# Altium footprint library Footprint-Lib-PhilsLab.PcbLib: 351 footprints (part 14 of 22)
Each footprint in its own frame and in the unit in brackets; x right, y up, seen from the top. Pads: shape width x height; smd on the part's side, far side on the other; paste and mask are expansions set on the pad; w line width, h text height; cw(c..) or ccw(c..) is an arc to the next point about the centre after c.
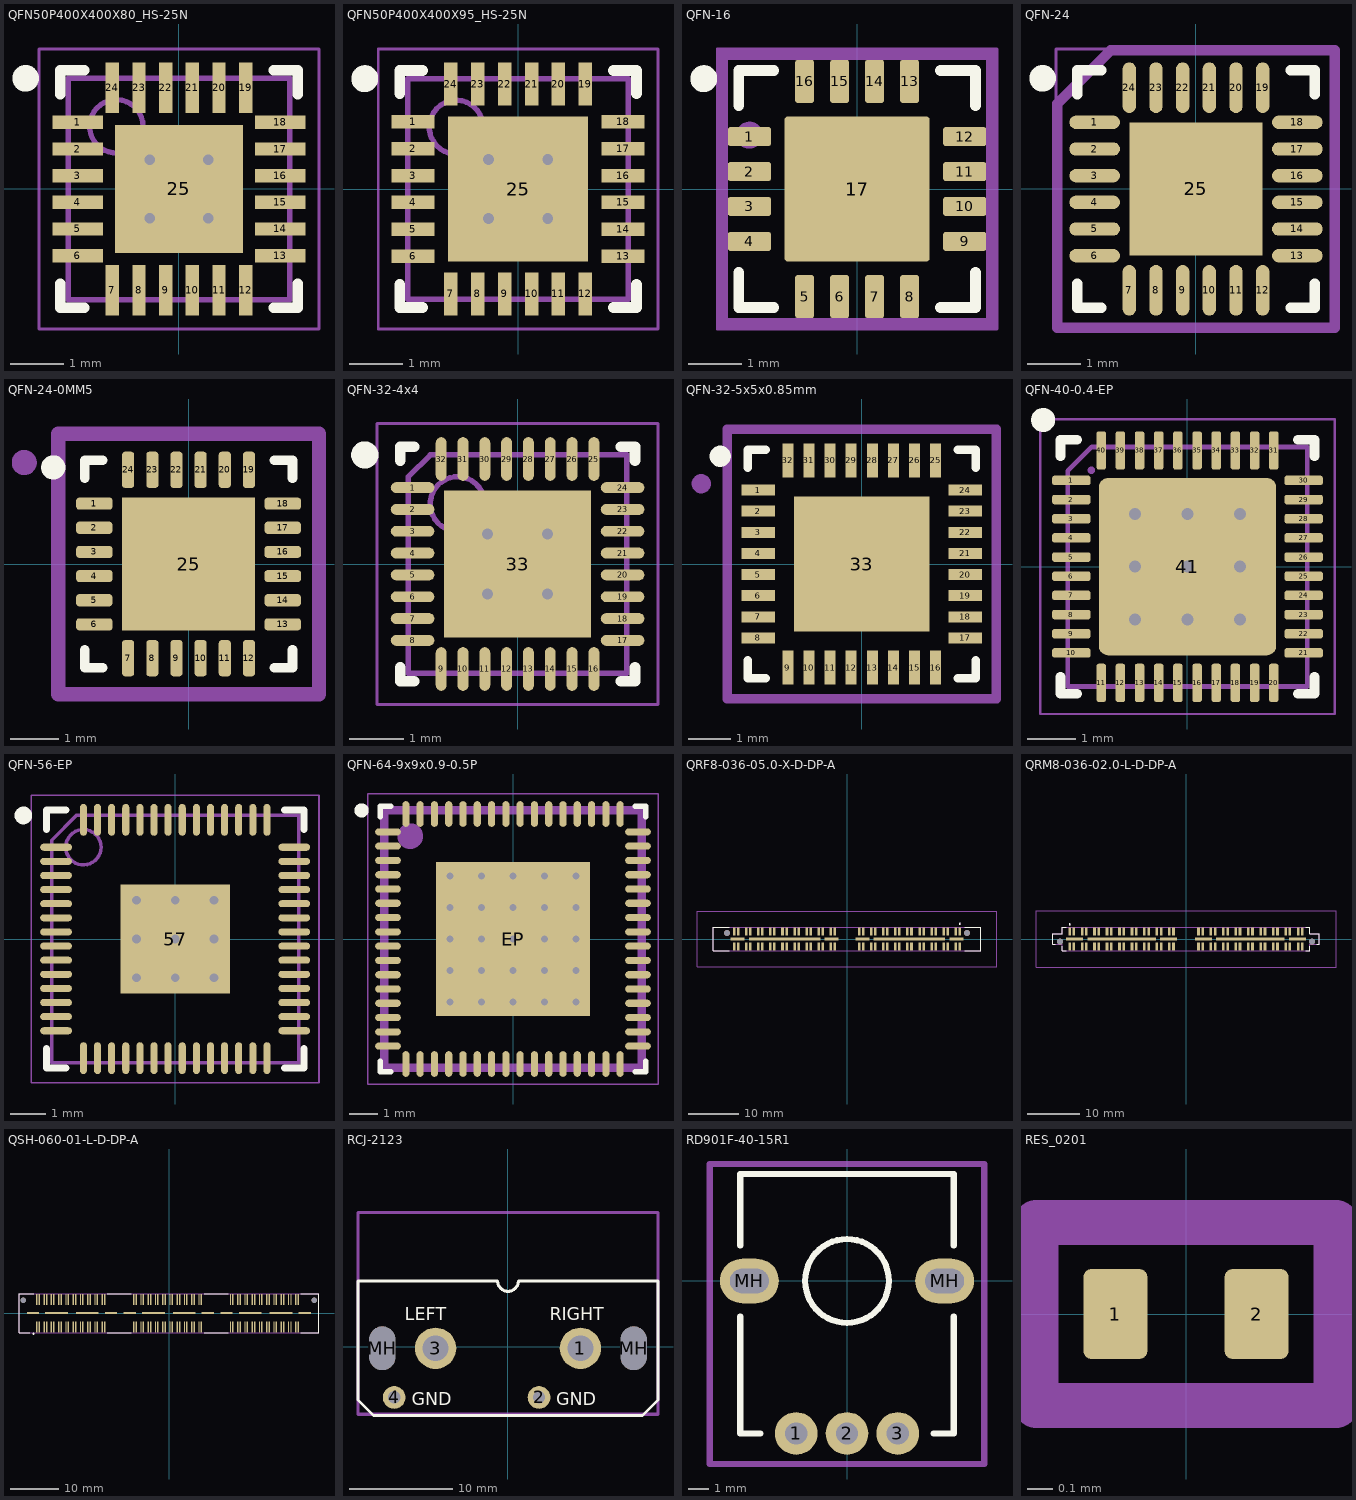
[diagram p13: the footprints below, top view; thin cyan lines are the x and y axes]

## QFN50P400X400X80_HS-25N [mm] "QFN, 24-Leads, Body 4.00x4.00mm, Pitch 0.50mm, Thermal Pad 2.50x2.50mm, IPC Medium Density"
height 0.8
pads (25):
  rect 0.95x0.25 smd mask+0.05: 1(-1.9,1.25) 2(-1.9,0.75) 3(-1.9,0.25) 4(-1.9,-0.25) 5(-1.9,-0.75) 6(-1.9,-1.25) 13(1.9,-1.25) 14(1.9,-0.75) 15(1.9,-0.25) 16(1.9,0.25) 17(1.9,0.75) 18(1.9,1.25)
  rect 0.25x0.95 smd mask+0.05: 7(-1.25,-1.9) 8(-0.75,-1.9) 9(-0.25,-1.9) 10(0.25,-1.9) 11(0.75,-1.9) 12(1.25,-1.9) 19(1.25,1.9) 20(0.75,1.9) 21(0.25,1.9) 22(-0.25,1.9) 23(-0.75,1.9) 24(-1.25,1.9)
  rect 2.4x2.4 smd mask+0.07: 25(0,0)
via 0.55,-0.55 diameter 0.5 hole 0.2
via -0.55,-0.55 diameter 0.5 hole 0.2
via 0.55,0.55 diameter 0.5 hole 0.2
via -0.55,0.55 diameter 0.5 hole 0.2
Top Overlay:
  circle w0.25: c-2.875,2.075 r0.125
  lines w0.2: -2.225,-1.775 -2.225,-2.225 -1.775,-2.225 ; -2.225,1.775 -2.225,2.225 -1.775,2.225 ; 1.775,-2.225 2.225,-2.225 2.225,-1.775 ; 1.775,2.225 2.225,2.225 2.225,1.775
Mechanical 13:
  circle w0.1: c-1.175,1.175 r0.5
  lines w0.1: -2.075,-2.075 2.075,-2.075 2.075,2.075 -2.075,2.075 -2.075,-2.075
  text "'.Designator'" at -5.84,-0.925 h1
Mechanical 15:
  lines w0.05: -2.625,-2.625 2.625,-2.625 2.625,2.625 -2.625,2.625 -2.625,-2.625
  lines w0.1: -0.5,0 0.5,0 ; 0,-0.5 0,0.5
3D body "QFN50P400X400X80_HS-25N.step": height 0.8, standoff 0, extent -2.125,-2.125 2.125,2.125

## QFN50P400X400X95_HS-25N [mm] "QFN, 24-Leads, Body 4.00x4.00mm, Pitch 0.50mm, Thermal Pad 2.60x2.70mm, IPC Medium Density"
height 0.95
pads (25):
  rect 0.8x0.25 smd mask+0.05: 1(-1.95,1.25) 2(-1.95,0.75) 3(-1.95,0.25) 4(-1.95,-0.25) 5(-1.95,-0.75) 6(-1.95,-1.25) 13(1.95,-1.25) 14(1.95,-0.75) 15(1.95,-0.25) 16(1.95,0.25) 17(1.95,0.75) 18(1.95,1.25)
  rect 0.25x0.8 smd mask+0.05: 7(-1.25,-1.95) 8(-0.75,-1.95) 9(-0.25,-1.95) 10(0.25,-1.95) 11(0.75,-1.95) 12(1.25,-1.95) 19(1.25,1.95) 20(0.75,1.95) 21(0.25,1.95) 22(-0.25,1.95) 23(-0.75,1.95) 24(-1.25,1.95)
  rect 2.6x2.7 smd mask+0.05: 25(0,0)
via -0.55,0.55 diameter 0.5 hole 0.2
via 0.55,0.55 diameter 0.5 hole 0.2
via -0.55,-0.55 diameter 0.5 hole 0.2
via 0.55,-0.55 diameter 0.5 hole 0.2
Top Overlay:
  circle w0.25: c-2.85,2.05 r0.125
  lines w0.2: -2.2,-1.775 -2.2,-2.2 -1.775,-2.2 ; -2.2,1.775 -2.2,2.2 -1.775,2.2 ; 1.775,-2.2 2.2,-2.2 2.2,-1.775 ; 1.775,2.2 2.2,2.2 2.2,1.775
Mechanical 13:
  circle w0.1: c-1.15,1.15 r0.5
  lines w0.1: -2.05,-2.05 -2.05,2.05 2.05,2.05 2.05,-2.05 -2.05,-2.05
  text "'.Designator'" at -5.84,-0.925 h1
Mechanical 15:
  lines w0.05: -2.6,-2.6 -2.6,2.6 2.6,2.6 2.6,-2.6 -2.6,-2.6
  lines w0.1: -0.5,0 0.5,0 ; 0,-0.5 0,0.5
3D body "ICM-20689.STEP": height 0.94, standoff -0.01, extent -2,-2 2,2

## QFN-16 [mm]
height 1
pads (17):
  rrect25% 0.8x0.35 smd mask+0.07: 1(-2,0.975) 2(-2,0.325) 3(-2,-0.325) 4(-2,-0.975) 9(2,-0.975) 10(2,-0.325) 11(2,0.325) 12(2,0.975)
  rrect25% 0.35x0.8 smd mask+0.07: 5(-0.975,-2) 6(-0.325,-2) 7(0.325,-2) 8(0.975,-2) 13(0.975,2) 14(0.325,2) 15(-0.325,2) 16(-0.975,2)
  rrect5% 2.7x2.7 smd mask+0.07: 17(0,0)
Top Overlay:
  circle w0.25: c-2.85,2.05 r0.125
  lines w0.2: -2.2,-1.55 -2.2,-2.2 -1.55,-2.2 ; -2.2,1.55 -2.2,2.2 -1.55,2.2 ; 1.55,-2.2 2.2,-2.2 2.2,-1.55 ; 1.55,2.2 2.2,2.2 2.2,1.55
Mechanical 13:
  circle w0.25: c-2,1 r0.125
  lines w0.2: -2.5,-2.5 2.5,-2.5 2.5,2.5 -2.5,2.5 -2.5,-2.5
  text "'.Designator'" at -5.665,-0.417 h1
Mechanical 15:
  lines w0.05: -2.6,-2.6 2.6,-2.6 2.6,2.6 -2.6,2.6 -2.6,-2.6
  lines w0.1: -0.5,0 0.5,0 ; 0,-0.5 0,0.5
3D body "QFN-16.step": height 1, standoff 0, extent -2.13,-2.13 2.13,2.13

## QFN-24 [mm] "QFN, 24-Leads, Body 4.00x4.00mm, Pitch 0.50mm, Thermal Pad 2.50x2.50mm, IPC Medium Density"
height 1
pads (25):
  oval 0.95x0.25 smd mask+0.03: 1(-1.9,1.25) 2(-1.9,0.75) 3(-1.9,0.25) 4(-1.9,-0.25) 5(-1.9,-0.75) 6(-1.9,-1.25) 13(1.9,-1.25) 14(1.9,-0.75) 15(1.9,-0.25) 16(1.9,0.25) 17(1.9,0.75) 18(1.9,1.25)
  oval 0.25x0.95 smd mask+0.03: 7(-1.25,-1.9) 8(-0.75,-1.9) 9(-0.25,-1.9) 10(0.25,-1.9) 11(0.75,-1.9) 12(1.25,-1.9) 19(1.25,1.9) 20(0.75,1.9) 21(0.25,1.9) 22(-0.25,1.9) 23(-0.75,1.9) 24(-1.25,1.9)
  rect 2.5x2.5 smd mask+0.03: 25(0,0)
Top Overlay:
  circle w0.25: c-2.875,2.075 r0.125
  lines w0.2: -2.225,-1.775 -2.225,-2.225 -1.775,-2.225 ; -2.225,1.775 -2.225,2.225 -1.775,2.225 ; 1.775,-2.225 2.225,-2.225 2.225,-1.775 ; 1.775,2.225 2.225,2.225 2.225,1.775
Mechanical 13:
  lines w0.2: -2.6,-2.6 2.6,-2.6 2.6,2.6 -1.6,2.6 -2.6,1.6 -2.6,-2.6
  text "'.Designator'" at -6.315,-1.4 h1
Mechanical 15:
  lines w0.05: -2.625,-2.625 -2.625,2.625 2.625,2.625 2.625,-2.625 -2.625,-2.625
  lines w0.1: -0.5,0 0.5,0 ; 0,-0.5 0,0.5
3D body "QFN-24.step": height 1, standoff 0, extent -2.076,-2.076 2.076,2.076

## QFN-24-0MM5 [mm]
height 0.6
pads (25):
  rrect50% 0.75x0.25 smd mask+0.05: 1(-1.95,1.25) 2(-1.95,0.75) 3(-1.95,0.25) 4(-1.95,-0.25) 5(-1.95,-0.75) 6(-1.95,-1.25) 13(1.95,-1.25) 14(1.95,-0.75) 15(1.95,-0.25) 16(1.95,0.25) 17(1.95,0.75) 18(1.95,1.25)
  rrect50% 0.25x0.75 smd mask+0.05: 7(-1.25,-1.95) 8(-0.75,-1.95) 9(-0.25,-1.95) 10(0.25,-1.95) 11(0.75,-1.95) 12(1.25,-1.95) 19(1.25,1.95) 20(0.75,1.95) 21(0.25,1.95) 22(-0.25,1.95) 23(-0.75,1.95) 24(-1.25,1.95)
  rect 2.75x2.75 smd mask+0.3: 25(0,0)
Top Overlay:
  circle w0.25: c-2.8,2 r0.125
  lines w0.2: -2.15,-1.775 -2.15,-2.15 -1.775,-2.15 ; -2.15,1.775 -2.15,2.15 -1.775,2.15 ; 1.775,-2.15 2.15,-2.15 2.15,-1.775 ; 1.775,2.15 2.15,2.15 2.15,1.775
Mechanical 13:
  circle w0.3: c-3.4,2.1 r0.109
  lines w0.3: -2.7,-2.7 2.7,-2.7 2.7,2.7 -2.7,2.7 -2.7,-2.7
  text "'.Designator'" at -5.815,-0.9 h1
Mechanical 15:
  lines w0.05: -2.575,-2.575 2.575,-2.575 2.575,2.575 -2.575,2.575 -2.575,-2.575
  lines w0.1: -0.5,0 0.5,0 ; 0,-0.5 0,0.5
3D body "QFN-24-0MM5.step": height 0.6, standoff 0, extent -2.001,-2.001 2.001,2.001

## QFN-32-4x4 [mm] "QFN, 32-Leads, Body 4.00x4.00mm, Pitch 0.40mm, Thermal Pad 2.70x2.70mm, IPC Medium Density"
height 0.9
pads (33):
  oval 0.8x0.2 smd mask+0.05: 1(-1.925,1.4) 2(-1.925,1) 3(-1.925,0.6) 4(-1.925,0.2) 5(-1.925,-0.2) 6(-1.925,-0.6) 7(-1.925,-1) 8(-1.925,-1.4) 17(1.925,-1.4) 18(1.925,-1) 19(1.925,-0.6) 20(1.925,-0.2) 21(1.925,0.2) 22(1.925,0.6) 23(1.925,1) 24(1.925,1.4)
  oval 0.2x0.8 smd mask+0.05: 9(-1.4,-1.925) 10(-1,-1.925) 11(-0.6,-1.925) 12(-0.2,-1.925) 13(0.2,-1.925) 14(0.6,-1.925) 15(1,-1.925) 16(1.4,-1.925) 25(1.4,1.925) 26(1,1.925) 27(0.6,1.925) 28(0.2,1.925) 29(-0.2,1.925) 30(-0.6,1.925) 31(-1,1.925) 32(-1.4,1.925)
  rect 2.7x2.7 smd mask+0.05: 33(0,0)
via 0.55,-0.55 diameter 0.5 hole 0.2
via -0.55,-0.55 diameter 0.5 hole 0.2
via 0.55,0.55 diameter 0.5 hole 0.2
via -0.55,0.55 diameter 0.5 hole 0.2
Top Overlay:
  circle w0.25: c-2.8,2 r0.125
  lines w0.2: -2.15,-1.9 -2.15,-2.15 -1.9,-2.15 ; -2.15,1.9 -2.15,2.15 -1.9,2.15 ; 1.9,-2.15 2.15,-2.15 2.15,-1.9 ; 1.9,2.15 2.15,2.15 2.15,1.9
Mechanical 13:
  circle w0.1: c-1.1,1.1 r0.5
  lines w0.1: -2,-2 -2,1.6 -1.6,2 2,2 2,-2 -2,-2
  text "'.Designator'" at -7.231,-1.087 h1.25
Mechanical 15:
  lines w0.05: -2.575,-2.575 2.575,-2.575 2.575,2.575 -2.575,2.575 -2.575,-2.575
  lines w0.1: -0.5,0 0.5,0 ; 0,-0.5 0,0.5
3D body "QFN40P400X400X90_HS-33N.step": height 0.9, standoff 0, extent -2.02,-2.02 2.02,2.02

## QFN-32-5x5x0.85mm [mm]
height 1
pads (33):
  rect 0.8x0.26 smd mask+0.125: 1(-2.45,1.75) 2(-2.45,1.25) 3(-2.45,0.75) 4(-2.45,0.25) 5(-2.45,-0.25) 6(-2.45,-0.75) 7(-2.45,-1.25) 8(-2.45,-1.75) 17(2.45,-1.75) 18(2.45,-1.25) 19(2.45,-0.75) 20(2.45,-0.25) 21(2.45,0.25) 22(2.45,0.75) 23(2.45,1.25) 24(2.45,1.75)
  rect 0.26x0.8 smd mask+0.125: 9(-1.75,-2.45) 10(-1.25,-2.45) 11(-0.75,-2.45) 12(-0.25,-2.45) 13(0.25,-2.45) 14(0.75,-2.45) 15(1.25,-2.45) 16(1.75,-2.45) 25(1.75,2.45) 26(1.25,2.45) 27(0.75,2.45) 28(0.25,2.45) 29(-0.25,2.45) 30(-0.75,2.45) 31(-1.25,2.45) 32(-1.75,2.45)
  rect 3.2x3.2 smd: 33(0,0)
Top Overlay:
  circle w0.25: c-3.35,2.55 r0.125
  lines w0.2: -2.7,-2.275 -2.7,-2.7 -2.275,-2.7 ; -2.7,2.275 -2.7,2.7 -2.275,2.7 ; 2.275,-2.7 2.7,-2.7 2.7,-2.275 ; 2.275,2.7 2.7,2.7 2.7,2.275
Mechanical 13:
  circle w0.254: c-3.8,1.9 r0.1
  lines w0.2: -3.2,-3.2 3.2,-3.2 3.2,3.2 -3.2,3.2 -3.2,-3.2
  text "'.Designator'" at -5.665,-0.417 h1
Mechanical 15:
  lines w0.05: -3.1,-3.1 3.1,-3.1 3.1,3.1 -3.1,3.1 -3.1,-3.1
  lines w0.1: -0.5,0 0.5,0 ; 0,-0.5 0,0.5
3D body "QFN-32-5x5x0.85mm.step": height 1, standoff 0, extent -2.551,-2.551 2.551,2.551

## QFN-40-0.4-EP [mm] "QFN 40 Pads 0.4mm Pitch Thermal Pad"
height 0.9
pads (41):
  rrect50% 0.8x0.2 smd mask+0.15: 1(-2.425,1.8) 2(-2.425,1.4) 3(-2.425,1) 4(-2.425,0.6) 5(-2.425,0.2) 6(-2.425,-0.2) 7(-2.425,-0.6) 8(-2.425,-1) 9(-2.425,-1.4) 10(-2.425,-1.8) 21(2.425,-1.8) 22(2.425,-1.4) 23(2.425,-1) 24(2.425,-0.6) 25(2.425,-0.2) 26(2.425,0.2) 27(2.425,0.6) 28(2.425,1) 29(2.425,1.4) 30(2.425,1.8)
  rrect50% 0.2x0.8 smd mask+0.15: 11(-1.8,-2.425) 12(-1.4,-2.425) 13(-1,-2.425) 14(-0.6,-2.425) 15(-0.2,-2.425) 16(0.2,-2.425) 17(0.6,-2.425) 18(1,-2.425) 19(1.4,-2.425) 20(1.8,-2.425) 31(1.8,2.425) 32(1.4,2.425) 33(1,2.425) 34(0.6,2.425) 35(0.2,2.425) 36(-0.2,2.425) 37(-0.6,2.425) 38(-1,2.425) 39(-1.4,2.425) 40(-1.8,2.425)
  rrect10% 3.7x3.7 smd mask+0.15: 41(0,0)
via 1.1,-1.1 diameter 0.6 hole 0.25
via 0,-1.1 diameter 0.6 hole 0.25
via -1.1,-1.1 diameter 0.6 hole 0.25
via 1.1,0 diameter 0.6 hole 0.25
via 0,0 diameter 0.6 hole 0.25
via -1.1,0 diameter 0.6 hole 0.25
via 1.1,1.1 diameter 0.6 hole 0.25
via 0,1.1 diameter 0.6 hole 0.25
via -1.1,1.1 diameter 0.6 hole 0.25
Top Overlay:
  circle w0.25: c-3.012,3.061 r0.125
  lines w0.2: -2.65,-2.3 -2.65,-2.65 -2.3,-2.65 ; -2.65,2.3 -2.65,2.65 -2.3,2.65 ; 2.3,-2.65 2.65,-2.65 2.65,-2.3 ; 2.3,2.65 2.65,2.65 2.65,2.3
Mechanical 13:
  circle w0.1: c-2.007,2.012 r0.028
  lines w0.1: -2.5,-2.5 -2.5,2 -2,2.5 2.5,2.5 2.5,-2.5 -2.5,-2.5
  text "'.Designator'" at -5.815,-0.9 h1
Mechanical 15:
  lines w0.05: -3.075,-3.075 3.075,-3.075 3.075,3.075 -3.075,3.075 -3.075,-3.075
  lines w0.1: -0.5,0 0.5,0 ; 0,-0.5 0,0.5
3D body "QFN-40-0.4-EP.step": height 0.9, standoff 0, extent -2.501,-2.501 2.501,2.501

## QFN-56-EP [mm]
height 0.9
pads (57):
  oval 0.9x0.2 smd mask+0.15: 1(-3.375,2.6) 2(-3.375,2.2) 3(-3.375,1.8) 4(-3.375,1.4) 5(-3.375,1) 6(-3.375,0.6) 7(-3.375,0.2) 8(-3.375,-0.2) 9(-3.375,-0.6) 10(-3.375,-1) 11(-3.375,-1.4) 12(-3.375,-1.8) 13(-3.375,-2.2) 14(-3.375,-2.6) 29(3.375,-2.6) 30(3.375,-2.2) 31(3.375,-1.8) 32(3.375,-1.4) 33(3.375,-1) 34(3.375,-0.6) 35(3.375,-0.2) 36(3.375,0.2) 37(3.375,0.6) 38(3.375,1) 39(3.375,1.4) 40(3.375,1.8) 41(3.375,2.2) 42(3.375,2.6)
  oval 0.2x0.9 smd mask+0.15: 15(-2.6,-3.375) 16(-2.2,-3.375) 17(-1.8,-3.375) 18(-1.4,-3.375) 19(-1,-3.375) 20(-0.6,-3.375) 21(-0.2,-3.375) 22(0.2,-3.375) 23(0.6,-3.375) 24(1,-3.375) 25(1.4,-3.375) 26(1.8,-3.375) 27(2.2,-3.375) 28(2.6,-3.375) 43(2.6,3.375) 44(2.2,3.375) 45(1.8,3.375) 46(1.4,3.375) 47(1,3.375) 48(0.6,3.375) 49(0.2,3.375) 50(-0.2,3.375) 51(-0.6,3.375) 52(-1,3.375) 53(-1.4,3.375) 54(-1.8,3.375) 55(-2.2,3.375) 56(-2.6,3.375)
  rect 3.1x3.1 smd: 57(0,0)
via -1.1,1.1 diameter 0.6 hole 0.25
via 0,1.1 diameter 0.6 hole 0.25
via 1.1,1.1 diameter 0.6 hole 0.25
via -1.1,0 diameter 0.6 hole 0.25
via 0,0 diameter 0.6 hole 0.25
via 1.1,0 diameter 0.6 hole 0.25
via -1.1,-1.1 diameter 0.6 hole 0.25
via 0,-1.1 diameter 0.6 hole 0.25
via 1.1,-1.1 diameter 0.6 hole 0.25
Top Overlay:
  circle w0.25: c-4.3,3.5 r0.125
  lines w0.2: -3.65,-3.1 -3.65,-3.65 -3.1,-3.65 ; -3.65,3.1 -3.65,3.65 -3.1,3.65 ; 3.1,-3.65 3.65,-3.65 3.65,-3.1 ; 3.1,3.65 3.65,3.65 3.65,3.1
Mechanical 13:
  circle w0.1: c-2.6,2.6 r0.5
  lines w0.1: -3.5,-3.5 -3.5,2.8 -2.8,3.5 3.5,3.5 3.5,-3.5 -3.5,-3.5
  text "'.Designator'" at -6.315,-1.4 h1
Mechanical 15:
  lines w0.05: -4.075,-4.075 -4.075,4.075 4.075,4.075 4.075,-4.075 -4.075,-4.075
  lines w0.1: -0.5,0 0.5,0 ; 0,-0.5 0,0.5
3D body "RP2040.STEP": height 1.01, standoff 0.01, extent -3.51,-3.51 3.51,3.51

## QFN-64-9x9x0.9-0.5P [mm] "QFN, 64-Leads, Body 9.00x9.00mm, Pitch 0.50mm, Thermal Pad 5.40x5.40mm, IPC Medium Density"
height 1
pads (65):
  oval 0.9x0.25 smd mask+0.05: 1(-4.375,3.75) 2(-4.375,3.25) 3(-4.375,2.75) 4(-4.375,2.25) 5(-4.375,1.75) 6(-4.375,1.25) 7(-4.375,0.75) 8(-4.375,0.25) 9(-4.375,-0.25) 10(-4.375,-0.75) 11(-4.375,-1.25) 12(-4.375,-1.75) 13(-4.375,-2.25) 14(-4.375,-2.75) 15(-4.375,-3.25) 16(-4.375,-3.75) 33(4.375,-3.75) 34(4.375,-3.25) 35(4.375,-2.75) 36(4.375,-2.25) 37(4.375,-1.75) 38(4.375,-1.25) 39(4.375,-0.75) 40(4.375,-0.25) 41(4.375,0.25) 42(4.375,0.75) 43(4.375,1.25) 44(4.375,1.75) 45(4.375,2.25) 46(4.375,2.75) 47(4.375,3.25) 48(4.375,3.75)
  oval 0.25x0.9 smd mask+0.05: 17(-3.75,-4.375) 18(-3.25,-4.375) 19(-2.75,-4.375) 20(-2.25,-4.375) 21(-1.75,-4.375) 22(-1.25,-4.375) 23(-0.75,-4.375) 24(-0.25,-4.375) 25(0.25,-4.375) 26(0.75,-4.375) 27(1.25,-4.375) 28(1.75,-4.375) 29(2.25,-4.375) 30(2.75,-4.375) 31(3.25,-4.375) 32(3.75,-4.375) 49(3.75,4.375) 50(3.25,4.375) 51(2.75,4.375) 52(2.25,4.375) 53(1.75,4.375) 54(1.25,4.375) 55(0.75,4.375) 56(0.25,4.375) 57(-0.25,4.375) 58(-0.75,4.375) 59(-1.25,4.375) 60(-1.75,4.375) 61(-2.25,4.375) 62(-2.75,4.375) 63(-3.25,4.375) 64(-3.75,4.375)
  rect 5.4x5.4 smd: EP(0,0)
via 2.2,-2.2 diameter 0.6 hole 0.25
via 1.1,-2.2 diameter 0.6 hole 0.25
via 0,-2.2 diameter 0.6 hole 0.25
via -1.1,-2.2 diameter 0.6 hole 0.25
via -2.2,-2.2 diameter 0.6 hole 0.25
via 2.2,-1.1 diameter 0.6 hole 0.25
via 1.1,-1.1 diameter 0.6 hole 0.25
via 0,-1.1 diameter 0.6 hole 0.25
via -1.1,-1.1 diameter 0.6 hole 0.25
via -2.2,-1.1 diameter 0.6 hole 0.25
via 2.2,0 diameter 0.6 hole 0.25
via 1.1,0 diameter 0.6 hole 0.25
via 0,0 diameter 0.6 hole 0.25
via -1.1,0 diameter 0.6 hole 0.25
via -2.2,0 diameter 0.6 hole 0.25
via 2.2,1.1 diameter 0.6 hole 0.25
via 1.1,1.1 diameter 0.6 hole 0.25
via 0,1.1 diameter 0.6 hole 0.25
via -1.1,1.1 diameter 0.6 hole 0.25
via -2.2,1.1 diameter 0.6 hole 0.25
via 2.2,2.2 diameter 0.6 hole 0.25
via 1.1,2.2 diameter 0.6 hole 0.25
via 0,2.2 diameter 0.6 hole 0.25
via -1.1,2.2 diameter 0.6 hole 0.25
via -2.2,2.2 diameter 0.6 hole 0.25
Top Overlay:
  circle w0.25: c-5.3,4.5 r0.125
  lines w0.2: -4.65,-4.275 -4.65,-4.65 -4.275,-4.65 ; -4.65,4.275 -4.65,4.65 -4.275,4.65 ; 4.275,-4.65 4.65,-4.65 4.65,-4.275 ; 4.275,4.65 4.65,4.65 4.65,4.275
Mechanical 13:
  circle w0.5: c-3.6,3.6 r0.2
  lines w0.3: -4.5,-4.5 4.5,-4.5 4.5,4.5 -4.5,4.5 -4.5,-4.5
  text "'.Designator'" at -5.665,-0.417 h1
Mechanical 15:
  lines w0.05: -5.075,-5.075 5.075,-5.075 5.075,5.075 -5.075,5.075 -5.075,-5.075
  lines w0.1: -0.5,0 0.5,0 ; 0,-0.5 0,0.5
3D body "QFN-64-9x9x0.9-0.5P.step": height 1, standoff 0, extent -4.501,-4.501 4.501,4.501

## QRF8-036-05.0-X-D-DP-A [mm]
pads (80):
  rect 0.5x1.65 smd: 1(22.4,1.475) 2(22.4,-1.475) 3(21.6,1.475) 4(21.6,-1.475) 5(20,1.475) 6(20,-1.475) 7(19.2,1.475) 8(19.2,-1.475) 9(17.6,1.475) 10(17.6,-1.475) 11(16.8,1.475) 12(16.8,-1.475) 13(15.2,1.475) 14(15.2,-1.475) 15(14.4,1.475) 16(14.4,-1.475) 17(12.8,1.475) 18(12.8,-1.475) 19(12,1.475) 20(12,-1.475) 21(10.4,1.475) 22(10.4,-1.475) 23(9.6,1.475) 24(9.6,-1.475) 25(8,1.475) 26(8,-1.475) 27(7.2,1.475) 28(7.2,-1.475) 29(5.6,1.475) 30(5.6,-1.475) 31(4.8,1.475) 32(4.8,-1.475) 33(3.2,1.475) 34(3.2,-1.475) 35(2.4,1.475) 36(2.4,-1.475) 37(-2.4,1.475) 38(-2.4,-1.475) 39(-3.2,1.475) 40(-3.2,-1.475) 41(-4.8,1.475) 42(-4.8,-1.475) 43(-5.6,1.475) 44(-5.6,-1.475) 45(-7.2,1.475) 46(-7.2,-1.475) 47(-8,1.475) 48(-8,-1.475) 49(-9.6,1.475) 50(-9.6,-1.475) 51(-10.4,1.475) 52(-10.4,-1.475) 53(-12,1.475) 54(-12,-1.475) 55(-12.8,1.475) 56(-12.8,-1.475) 57(-14.4,1.475) 58(-14.4,-1.475) 59(-15.2,1.475) 60(-15.2,-1.475) 61(-16.8,1.475) 62(-16.8,-1.475) 63(-17.6,1.475) 64(-17.6,-1.475) 65(-19.2,1.475) 66(-19.2,-1.475) 67(-20,1.475) 68(-20,-1.475) 69(-21.6,1.475) 70(-21.6,-1.475) 71(-22.4,1.475) 72(-22.4,-1.475)
  rect 2.76x0.56 smd: 73(-21.72,0) 73(-3.08,0) 73(3.08,0) 73(21.72,0)
  rect 14.19x0.56 smd: 73(-12.4,0) 73(12.4,0)
  round 1.13 hole 1.13 unplated: ""(-23.8,1.2) ""(23.8,1.2)
Top Overlay:
  circle w0.2: c22.4,3 r0.1
  lines w0.2: -23.4,-2.3 -26.585,-2.3 -26.585,2.3 -23.4,2.3 ; 23.4,-2.3 26.585,-2.3 26.585,2.3 23.4,2.3
Mechanical 13:
  circle w0.2: c22.4,3 r0.1
  lines w0.1: -26.585,-2.3 -26.585,2.3 26.585,2.3 26.585,-2.3 -26.585,-2.3
  text "'.Designator'" at -6.315,-1.4 h1
Mechanical 15:
  lines w0.05: -29.765,-5.48 29.765,-5.48 29.765,5.48 -29.765,5.48 -29.765,-5.48
3D body "QRF8-036-05_0-L-D-DP-A.stp": height 6.51, standoff -1.03, extent -26.585,-2.3 26.585,2.3

## QRM8-036-02.0-L-D-DP-A [mm]
pads (80):
  rect 0.5x1.5 smd: 1(-22.4,1.425) 2(-22.4,-1.425) 3(-21.6,1.425) 4(-21.6,-1.425) 5(-20,1.425) 6(-20,-1.425) 7(-19.2,1.425) 8(-19.2,-1.425) 9(-17.6,1.425) 10(-17.6,-1.425) 11(-16.8,1.425) 12(-16.8,-1.425) 13(-15.2,1.425) 14(-15.2,-1.425) 15(-14.4,1.425) 16(-14.4,-1.425) 17(-12.8,1.425) 18(-12.8,-1.425) 19(-12,1.425) 20(-12,-1.425) 21(-10.4,1.425) 22(-10.4,-1.425) 23(-9.6,1.425) 24(-9.6,-1.425) 25(-8,1.425) 26(-8,-1.425) 27(-7.2,1.425) 28(-7.2,-1.425) 29(-5.6,1.425) 30(-5.6,-1.425) 31(-4.8,1.425) 32(-4.8,-1.425) 33(-3.2,1.425) 34(-3.2,-1.425) 35(-2.4,1.425) 36(-2.4,-1.425) 37(2.4,1.425) 38(2.4,-1.425) 39(3.2,1.425) 40(3.2,-1.425) 41(4.8,1.425) 42(4.8,-1.425) 43(5.6,1.425) 44(5.6,-1.425) 45(7.2,1.425) 46(7.2,-1.425) 47(8,1.425) 48(8,-1.425) 49(9.6,1.425) 50(9.6,-1.425) 51(10.4,1.425) 52(10.4,-1.425) 53(12,1.425) 54(12,-1.425) 55(12.8,1.425) 56(12.8,-1.425) 57(14.4,1.425) 58(14.4,-1.425) 59(15.2,1.425) 60(15.2,-1.425) 61(16.8,1.425) 62(16.8,-1.425) 63(17.6,1.425) 64(17.6,-1.425) 65(19.2,1.425) 66(19.2,-1.425) 67(20,1.425) 68(20,-1.425) 69(21.6,1.425) 70(21.6,-1.425) 71(22.4,1.425) 72(22.4,-1.425)
  rect 3.28x0.51 smd: 73(-21.46,0) 73(-3.33,0) 73(3.33,0) 73(21.46,0)
  rect 13.15x0.51 smd: 73(-12.395,0) 73(12.395,0)
  round 1.13 hole 1.13 unplated: ""(-24.25,-0.5) ""(24.25,-0.5)
Top Overlay:
  circle w0.2: c-22.4,2.81 r0.1
  lines w0.2: -25.165,-1.05 -25.685,-1.05 -25.685,1.05 -23.825,1.05 -23.825,2.3 -23,2.3 ; -23.825,-1.415 -23.825,-2.3 -23,-2.3 ; 23,-2.3 23.825,-2.3 23.825,-1.415 ; 23,2.3 23.825,2.3 23.825,1.05 25.685,1.05 25.685,-1.05 25.165,-1.05
Mechanical 13:
  circle w0.2: c-22.4,2.81 r0.1
  lines w0.1: -25.685,-1.05 -23.825,-1.05 -23.825,-2.3 23.825,-2.3 23.825,-1.05 25.685,-1.05 25.685,1.05 23.825,1.05 23.825,2.3 -23.825,2.3 -23.825,1.05 -25.685,1.05 -25.685,-1.05
  text "'.Designator'" at -6.315,-1.4 h1
Mechanical 15:
  lines w0.05: -28.865,-5.48 28.865,-5.48 28.865,5.48 -28.865,5.48 -28.865,-5.48
3D body "QRM8-036-02_0-L-D-DP-A.stp": height 4.82, standoff -1.31, extent -25.685,-2.3 25.685,2.3

## QSH-060-01-L-D-DP-A [mm]
pads (134):
  rect 0.28x2.27 smd mask+0.13: 1(-27.3,-2.87) 2(-27.3,2.87) 3(-26.8,-2.87) 4(-26.8,2.87) 5(-25.8,-2.87) 6(-25.8,2.87) 7(-25.3,-2.87) 8(-25.3,2.87) 9(-24.3,-2.87) 10(-24.3,2.87) 11(-23.8,-2.87) 12(-23.8,2.87) 13(-22.8,-2.87) 14(-22.8,2.87) 15(-22.3,-2.87) 16(-22.3,2.87) 17(-21.3,-2.87) 18(-21.3,2.87) 19(-20.8,-2.87) 20(-20.8,2.87) 21(-19.8,-2.87) 22(-19.8,2.87) 23(-19.3,-2.87) 24(-19.3,2.87) 25(-18.3,-2.87) 26(-18.3,2.87) 27(-17.8,-2.87) 28(-17.8,2.87) 29(-16.8,-2.87) 30(-16.8,2.87) 31(-16.3,-2.87) 32(-16.3,2.87) 33(-15.3,-2.87) 34(-15.3,2.87) 35(-14.8,-2.87) 36(-14.8,2.87) 37(-13.8,-2.87) 38(-13.8,2.87) 39(-13.3,-2.87) 40(-13.3,2.87) 41(-7.3,-2.87) 42(-7.3,2.87) 43(-6.8,-2.87) 44(-6.8,2.87) 45(-5.8,-2.87) 46(-5.8,2.87) 47(-5.3,-2.87) 48(-5.3,2.87) 49(-4.3,-2.87) 50(-4.3,2.87) 51(-3.8,-2.87) 52(-3.8,2.87) 53(-2.8,-2.87) 54(-2.8,2.87) 55(-2.3,-2.87) 56(-2.3,2.87) 57(-1.3,-2.87) 58(-1.3,2.87) 59(-0.8,-2.87) 60(-0.8,2.87) 61(0.2,-2.87) 62(0.2,2.87) 63(0.7,-2.87) 64(0.7,2.87) 65(1.7,-2.87) 66(1.7,2.87) 67(2.2,-2.87) 68(2.2,2.87) 69(3.2,-2.87) 70(3.2,2.87) 71(3.7,-2.87) 72(3.7,2.87) 73(4.7,-2.87) 74(4.7,2.87) 75(5.2,-2.87) 76(5.2,2.87) 77(6.2,-2.87) 78(6.2,2.87) 79(6.7,-2.87) 80(6.7,2.87) 81(12.7,-2.87) 82(12.7,2.87) 83(13.2,-2.87) 84(13.2,2.87) 85(14.2,-2.87) 86(14.2,2.87) 87(14.7,-2.87) 88(14.7,2.87) 89(15.7,-2.87) 90(15.7,2.87) 91(16.2,-2.87) 92(16.2,2.87) 93(17.2,-2.87) 94(17.2,2.87) 95(17.7,-2.87) 96(17.7,2.87) 97(18.7,-2.87) 98(18.7,2.87) 99(19.2,-2.87) 100(19.2,2.87) 101(20.2,-2.87) 102(20.2,2.87) 103(20.7,-2.87) 104(20.7,2.87) 105(21.7,-2.87) 106(21.7,2.87) 107(22.2,-2.87) 108(22.2,2.87) 109(23.2,-2.87) 110(23.2,2.87) 111(23.7,-2.87) 112(23.7,2.87) 113(24.7,-2.87) 114(24.7,2.87) 115(25.2,-2.87) 116(25.2,2.87) 117(26.2,-2.87) 118(26.2,2.87) 119(26.7,-2.87) 120(26.7,2.87)
  rect 2.54x0.43 smd: EP(-28.12,0) EP(-11.99,0) EP(-8.11,0) EP(8.02,0) EP(11.9,0) EP(28.03,0)
  rect 4.7x0.43 smd: EP(-23.23,0) EP(-16.88,0) EP(-3.22,0) EP(3.13,0) EP(16.79,0) EP(23.14,0)
  round 1.05 hole 1.05 unplated: MH(-30.114,2.67) MH(30.01,2.67)
Top Overlay:
  circle w0.3: c-28,-4.25 r0.1
  lines w0.2: -28.75,-4 -31,-4 -31,4 -28,4 ; -12.75,-4 -7.8,-4 ; -12.75,4 -7.8,4 ; 7.25,-4 12.2,-4 ; 7.25,4 12.2,4 ; 27.25,-4 31,-4 31,4 27.25,4
Mechanical 13:
  lines w0.2: -31,-4 -31,4 31,4 31,-4 -31,-4
  text "'.Designator'" at -5.815,-0.9 h1
  text "1" at -28.657,-3.4 h1
  text "2" at -28.733,2.1 h1
3D body "QSH-060-01-L-D-DP-A.stp": height 3.26, standoff -0.74, extent -30.69,-3.747 30.69,3.747

## RCJ-2123 [mm]
pads (6):
  round 4 hole 2.5: 1(7,-0.125) 3(-7,-0.125)
  round 2.2 hole 1.2: 2(3,-4.875) 4(-11,-4.875)
  oval 2.5x4.2 hole 2.5 slot 4.2 at 90 deg unplated: MH(-12.15,-0.125) MH(12.15,-0.125)
Top Overlay:
  lines w0.3: -14.5,-5.125 -14.5,6.375 -1,6.375 ccw(c0,6.375) 0,5.375 ccw(c0,6.375) 1,6.375 14.5,6.375 14.5,-5.125 13,-6.625 -13,-6.625 -14.5,-5.125
  text "GND" at -9.316,-5.65 h1.25
  text "GND" at 4.684,-5.65 h1.25
  text "LEFT" at -9.962,2.6 h1.25
  text "RIGHT" at 4.038,2.6 h1.25
Mechanical 13:
  lines w0.3: -14.5,-6.5 14.5,-6.5 14.5,13 -14.5,13 -14.5,-5.5 -14.5,-6.5
  text "'.Designator'" at -7.231,-1.087 h1.25
3D body "CUI_DEVICES_RCJ-2123.step": height 20.51, standoff -4.19, extent -13.69,-5.127 13.71,13.173

## RD901F-40-15R1 [mm]
pads (5):
  round 2.1 hole 1.1: 1(-2.5,-7.5) 2(0,-7.5) 3(2.5,-7.5)
  oval 2.9x2.2 hole 1.2 slot 1.9 at 0 deg: MH(-4.8,0) MH(4.8,0)
Top Overlay:
  circle w0.3: c0,0 r2.059
  lines w0.3: -5.25,-1.75 -5.25,-7.5 -4.25,-7.5 ; -5.25,1.75 -5.25,5.25 5.25,5.25 5.25,1.75 ; 4.25,-7.5 5.25,-7.5 5.25,-1.75
Mechanical 13:
  lines w0.3: -6.75,-9 -6.75,5.75 6.75,5.75 6.75,-9 -6.75,-9
  text ".Designator" at -4.998,-0.333 h1
3D body "RD901F-40-15R1.step": height 25.01, standoff -3.49, extent -5.854,-7.65 5.854,4.85

## RES_0201 [mm]
pads (2):
  rrect25% 0.25x0.35 smd mask+0.05: 1(-0.275,0) 2(0.275,0)
Mechanical 13:
  lines w0.175: -0.584,-0.356 -0.584,0.356 0.584,0.356 0.584,-0.356 -0.584,-0.356
  text "'.Designator'" at -5.665,-0.417 h1
3D body "R0201.step": height 0.15, standoff 0, extent -0.3,-0.15 0.3,0.15